# Altium footprint library Amin-Library.PcbLib: 601 footprints (part 35 of 38)
Each footprint in its own frame and in the unit in brackets; x right, y up, seen from the top. Pads: shape width x height; smd on the part's side, far side on the other; paste and mask are expansions set on the pad; w line width, h text height; cw(c..) or ccw(c..) is an arc to the next point about the centre after c.
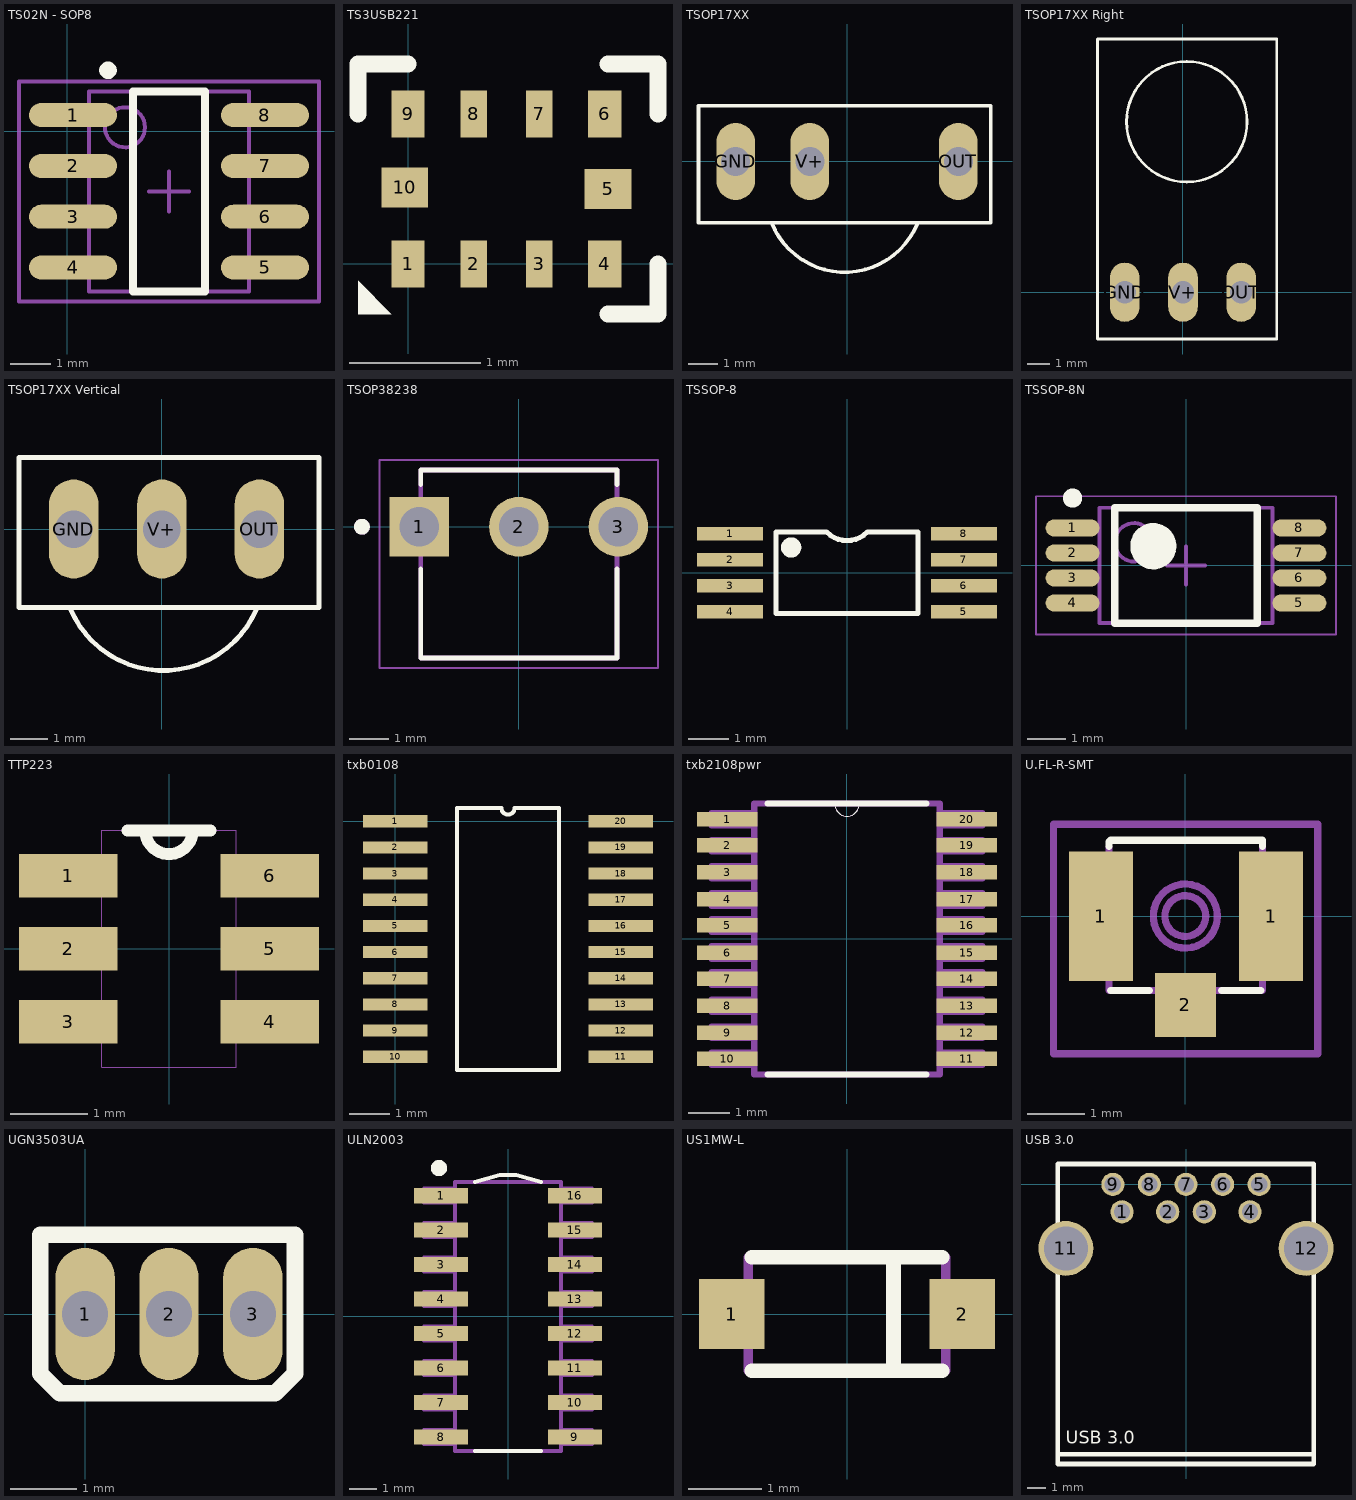
[diagram p34: the footprints below, top view; thin cyan lines are the x and y axes]

## TS02N - SOP8 [mm] "Designed by Hadi Aghabeigi - PANIC Electronic"
height 4
pads (8):
  oval 2.2x0.6 smd: 1(0.14,0.41) 2(0.14,-0.86) 3(0.14,-2.13) 4(0.14,-3.4) 5(4.94,-3.4) 6(4.94,-2.13) 7(4.94,-0.86) 8(4.94,0.41)
Top Overlay:
  circle w0.25: c1.015,1.53 r0.094
  lines w0.2: 1.64,-3.995 1.64,1.005 3.44,1.005 3.44,-3.995 1.64,-3.995
Mechanical 13:
  circle w0.1: c1.44,0.105 r0.5
  lines w0.1: 0.54,-3.995 0.54,1.005 4.54,1.005 4.54,-3.995 0.54,-3.995
Mechanical 15:
  lines w0.1: 2.04,-1.495 3.04,-1.495 ; 2.54,-1.995 2.54,-0.995 ; -1.21,-4.245 -1.21,1.255 6.29,1.255 6.29,-4.245 -1.21,-4.245
3D body: height 1.75, standoff 0, extent 0.54,-3.995 4.54,1.005

## TS3USB221 [mil] "USB multiplex"
pads (10):
  rect 10x14 smd: 1(0,0) 4(59.05,0) 6(59.05,45) 9(0,45)
  rect 8x14 smd: 2(19.68,0) 3(39.37,0) 7(39.37,45) 8(19.68,45)
  rect 14x12 smd: 5(60,22.5) 10(-1,23)
Top Overlay:
  region: -15,-5 -5,-15 -15,-15
  lines w5: -15,45 -15,60 0,60 ; 60,-15 75,-15 75,0 ; 60,60 75,60 75,45

## TSOP17XX [mil] "IR Receiver Dip"
pads (3):
  oval 52x104 hole 39.37: GND(-150,0) OUT(150,0) V+(-50,0)
Top Overlay:
  lines w5: -101.44,-82.82 ccw(c-3.15,-43.11) 95.14,-82.82 ; -200,-82.48 -200,75 -101.57,75 95.28,75 193.7,75 193.7,-82.48 95.28,-82.48 -101.57,-82.48 -200,-82.48
3D body "step_temp.STEP": height 1224.41, standoff 0, extent -196.85,-165.35 196.85,62.99

## TSOP17XX Right [mil] "IR Receiver Dip"
pads (3):
  oval 52x104 hole 39.37: GND(-102.36,0) OUT(102.36,0) V+(0,0)
Top Overlay:
  circle w5: c6.71,299.71 r106.01
  lines w5: -150,-82.28 -51.57,-82.28 145.28,-82.28 165,-82.28 165,445.2 -150,445.2 -150,-82.28
3D body "User Library-User Library-TSSP40_IR reciver.step": height 205.36, standoff -96.46, extent -116.22,-8.33 120,438.33

## TSOP17XX Vertical [mil] "IR Receiver Dip"
pads (3):
  oval 52x104 hole 39.37: GND(-92.52,0) OUT(102.36,0) V+(0,0)
Top Overlay:
  lines w5: -96.58,-82.28 ccw(c1.71,-42.57) 100,-82.28 ; -150,-82.28 -51.57,-82.28 145.28,-82.28 165,-82.28 165,75.2 145.28,75.2 -51.57,75.2 -150,75.2 -150,-82.28
3D body "User Library-IR Receiver.step": height 334.65, standoff -90.55, extent -117.05,-171.22 127.05,65

## TSOP38238 [mm]
pads (3):
  rect 1.518x1.518 hole 1.01: 1(-2.54,0)
  round 1.518 hole 1.01: 2(0,0) 3(2.54,0)
Top Overlay:
  circle w0.2: c-4,0 r0.1
  lines w0.127: -2.5,-1.08 -2.5,-3.35 2.5,-3.35 2.5,-1.08 ; -2.5,1.08 -2.5,1.45 2.5,1.45 2.5,1.08
Mechanical 13:
  circle w0.2: c-4,0 r0.1
  lines w0.127: -2.5,-3.35 2.5,-3.35 2.5,1.45 -2.5,1.45 -2.5,-3.35
Mechanical 15:
  lines w0.05: -3.55,-3.6 3.55,-3.6 3.55,1.7 -3.55,1.7 -3.55,-3.6
3D body "User Library-TSOP18x.step": height 10.95, standoff -4, extent -2.89,-3.4 2.89,1.4

## TSSOP-8 [mil]
pads (8):
  rect 65x13.5 smd: 1(-115.2,38.4) 2(-115.2,12.8) 3(-115.2,-12.8) 4(-115.2,-38.4) 5(115.2,-38.4) 6(115.2,-12.8) 7(115.2,12.8) 8(115.2,38.4)
Top Overlay:
  circle w10: c-55,25 r5
  lines w5: -70,-40 -70,40 -20,40 ccw(c0,60) 20,40 70,40 70,-40 -70,-40
3D body "User Library-TSSOP-8.STEP": height 47.24, standoff 0, extent -125.99,-59.06 125.98,59.05

## TSSOP-8N [mm]
height 1.2
pads (8):
  oval 1.4x0.45 smd: 1(-2.95,0.975) 2(-2.95,0.325) 3(-2.95,-0.325) 4(-2.95,-0.975) 5(2.95,-0.975) 6(2.95,-0.325) 7(2.95,0.325) 8(2.95,0.975)
Top Overlay:
  circle w0.25: c-2.95,1.75 r0.125
  circle w0.6: c-0.85,0.5 r0.3
  lines w0.2: -1.85,-1.5 -1.85,1.5 1.85,1.5 1.85,-1.5 -1.85,-1.5
Mechanical 13:
  circle w0.1: c-1.35,0.6 r0.5
  lines w0.1: -2.25,-1.5 -2.25,1.5 2.25,1.5 2.25,-1.5 -2.25,-1.5
Mechanical 15:
  lines w0.05: -3.9,-1.8 -3.9,1.8 3.9,1.8 3.9,-1.8 -3.9,-1.8
  lines w0.1: -0.5,0 0.5,0 ; 0,-0.5 0,0.5
3D body: height 1.2, standoff 0.05, extent -2.25,-1.5 2.25,1.5

## TTP223 [mil]
pads (6):
  rect 50x22 smd: 1(-51,37) 2(-51,0) 3(-51,-37) 4(51,-37) 5(51,0) 6(51,37)
Top Overlay:
  lines w6: -21,60 -12,60 ; 21,60 12,60 ; -12,60 ccw(c0,60) 12,60 ; -12,60 12,60
Mechanical 4:
  lines w0: -59,-47 -59,-28 ; -59,-47 -34,-47 ; -59,-47 -59,-28 ; -59,-47 -34,-47 ; -59,-28 -34,-28 ; -59,-28 -34,-28 ; -59,-10 -59,10 ; -59,-10 -34,-10 ; -59,-10 -59,10 ; -59,-10 -34,-10 ; -59,10 -34,10 ; -59,10 -34,10 ; -59,28 -59,47 ; -59,28 -34,28 ; -59,28 -59,47 ; -59,28 -34,28 ; -59,47 -34,47 ; -59,47 -34,47 ; -34,-60 34,-60 ; -34,-60 -34,-47 ; -34,-60 34,-60 ; -34,-60 -34,-47 ; -34,-47 -34,-28 ; -34,-47 -34,-28 ; -34,-28 -34,-10 ; -34,-28 -34,-10 ; -34,-10 -34,10 ; -34,-10 -34,10 ; -34,10 -34,28 ; -34,10 -34,28 ; -34,28 -34,47 ; -34,28 -34,47 ; -34,47 -34,60 ; -34,47 -34,60 ; -34,60 -12,60 ; -34,60 -12,60 ; -12,60 ccw(c0,60) 12,60 ; -12,60 ccw(c0,60) 12,60 ; -12,60 12,60 ; -12,60 12,60 ; 12,60 34,60 ; 12,60 34,60 ; 34,-60 34,-47 ; 34,-60 34,-47 ; 34,-47 34,-28 ; 34,-47 59,-47 ; 34,-47 34,-28 ; 34,-47 59,-47 ; 34,-28 34,-10 ; 34,-28 59,-28 ; 34,-28 34,-10 ; 34,-28 59,-28 ; 34,-10 34,10 ; 34,-10 59,-10 ; 34,-10 34,10 ; 34,-10 59,-10 ; 34,10 34,28 ; 34,10 59,10 ; 34,10 34,28 ; 34,10 59,10 ; 34,28 34,47 ; 34,28 59,28 ; 34,28 34,47 ; 34,28 59,28 ; 34,47 34,60 ; 34,47 59,47 ; 34,47 34,60 ; 34,47 59,47 ; 59,-47 59,-28 ; 59,-47 59,-28 ; 59,-10 59,10 ; 59,-10 59,10 ; 59,28 59,47 ; 59,28 59,47
3D body "User Library-SOT23-6-2.STEP": height 57.09, standoff 0, extent -55.11,-57.09 55.13,57.08

## txb0108 [mm]
pads (20):
  rect 1.6x0.3 smd: 1(0,0) 2(0,-0.65) 3(0,-1.3) 4(0,-1.95) 5(0,-2.6) 6(0,-3.25) 7(0,-3.9) 8(0,-4.55) 9(0,-5.2) 10(0,-5.85) 11(5.6,-5.85) 12(5.6,-5.2) 13(5.6,-4.55) 14(5.6,-3.9) 15(5.6,-3.25) 16(5.6,-2.6) 17(5.6,-1.95) 18(5.6,-1.3) 19(5.6,-0.65) 20(5.6,0)
Top Overlay:
  lines w0.1: 1.535,-6.175 4.065,-6.175 4.065,0.325 2.962,0.325 cw(c2.8,0.325) 2.638,0.325 1.535,0.325 1.535,-6.175
3D body "TXB0108PWR--3DModel-STEP-56544 (2).STEP": height 1.18, standoff -0.02, extent -0.406,-6.171 5.994,0.329

## txb2108pwr [mil]
pads (20):
  rect 58x14 smd: 1(-115,115) 2(-115,90) 3(-115,64) 4(-115,38) 5(-115,13) 6(-115,-13) 7(-115,-38) 8(-115,-64) 9(-115,-90) 10(-115,-115) 11(115,-115) 12(115,-90) 13(115,-64) 14(115,-38) 15(115,-13) 16(115,13) 17(115,38) 18(115,64) 19(115,90) 20(115,115)
Top Overlay:
  lines w0: -12,130 ccw(c0,130) 12,130
  lines w6: -76,-130 76,-130 ; -76,130 -12,130 12,130 76,130
Mechanical 1:
  lines w0: -12,130 ccw(c0,130) 12,130
  lines w6: -130,-121 -130,-109 -89,-109 -89,-121 -130,-121 ; -130,-95 -130,-84 -89,-84 -89,-95 -130,-95 ; -130,-70 -130,-58 -89,-58 -89,-70 -130,-70 ; -130,-44 -130,-32 -89,-32 -89,-44 -130,-44 ; -130,-19 -130,-7 -89,-7 -89,-19 -130,-19 ; -130,7 -130,19 -89,19 -89,7 -130,7 ; -130,32 -130,44 -89,44 -89,32 -130,32 ; -130,58 -130,70 -89,70 -89,58 -130,58 ; -130,84 -130,95 -89,95 -89,84 -130,84 ; -130,109 -130,121 -89,121 -89,109 -130,109 ; -89,-130 89,-130 89,130 12,130 -12,130 -89,130 -89,-130 ; 89,-121 89,-109 130,-109 130,-121 89,-121 ; 89,-95 89,-84 130,-84 130,-95 89,-95 ; 89,-70 89,-58 130,-58 130,-70 89,-70 ; 89,-44 89,-32 130,-32 130,-44 89,-44 ; 89,-19 89,-7 130,-7 130,-19 89,-19 ; 89,7 89,19 130,19 130,7 89,7 ; 89,32 89,44 130,44 130,32 89,32 ; 89,58 89,70 130,70 130,58 89,58 ; 89,84 89,95 130,95 130,84 89,84 ; 89,109 89,121 130,121 130,109 89,109

## U.FL-R-SMT [mil]
pads (3):
  rect 44x89 smd: 1(-58.07,0) 1(59,0)
  rect 42x44 smd: 2(0,-61.02)
Top Overlay:
  lines w5: -52.36,48 -52.36,51 ; -51.18,-51.18 -24.8,-51.18 ; -51.18,52 52,52 ; 25,-51.18 52,-51.18 ; 53,48 53,52
Mechanical 16:
  circle w5: c0,0 r22
  circle w5: c0,0 r14
  lines w5: -61.81,-35.04 -52.36,-35.04 -52.36,-35.43 ; -61.81,35 -52.36,35 ; -61.42,-35.43 -61.42,35 ; -52.36,-51.18 -52.36,47 ; -24.8,-51.18 25,-51.18 ; 53,-51.18 53,48 ; 53,-35.43 62,-35.43 62,35 55,35
Mechanical 27:
  lines w5: -90.55,-94.49 91,-94.49 91,63 -90.55,63 -90.55,-94.49
Mechanical 30:
  lines w5: -52.36,-51.18 -51.57,-51.18 ; 53,-35.83 53,-35.43

## UGN3503UA [mm] "TO-92"
height 22
pads (3):
  oval 0.9x2 hole 0.7: 1(0,0) 2(1.27,0) 3(2.54,0)
Top Overlay:
  lines w0.203: 0.127,-1.2 2.447,-1.2 ; 3.175,-0.11 3.175,1.2
  lines w0.254: -0.68,-0.901 -0.68,1.2 3.175,1.2 3.175,-0.901 2.876,-1.2 2.447,-1.2 -0.381,-1.2 -0.68,-0.901
3D body "TO-92.STEP": height 3.55, standoff -4.54, extent -0.78,-1.07 3.32,0.55

## ULN2003 [mil] "SOIC127P600X175-16N"
height 629.92
pads (16):
  rect 78x22 smd: 1(-97,175) 2(-97,125) 3(-97,75) 4(-97,25) 5(-97,-25) 6(-97,-75) 7(-97,-125) 8(-97,-175) 9(97,-175) 10(97,-125) 11(97,-75) 12(97,-25) 13(97,25) 14(97,75) 15(97,125) 16(97,175)
Top Overlay:
  circle w11.81: c-100,215 r5.91
  lines w6: -48,-195 48,-195 ; -48,195 -12,205 12,205 48,195
Mechanical 13:
  lines w6: -122,-185 -77,-185 -77,-165 -122,-165 -122,-185 ; -122,-135 -77,-135 -77,-115 -122,-115 -122,-135 ; -122,-85 -77,-85 -77,-65 -122,-65 -122,-85 ; -122,-35 -77,-35 -77,-15 -122,-15 -122,-35 ; -122,15 -77,15 -77,35 -122,35 -122,15 ; -122,65 -77,65 -77,85 -122,85 -122,65 ; -122,115 -77,115 -77,135 -122,135 -122,115 ; -122,165 -77,165 -77,185 -122,185 -122,165 ; -77,-195 -77,195 -12,195 12,195 77,195 77,-195 -77,-195 ; 77,-185 122,-185 122,-165 77,-165 77,-185 ; 77,-135 122,-135 122,-115 77,-115 77,-135 ; 77,-85 122,-85 122,-65 77,-65 77,-85 ; 77,-35 122,-35 122,-15 77,-15 77,-35 ; 77,15 122,15 122,35 77,35 77,15 ; 77,65 122,65 122,85 77,85 77,65 ; 77,115 122,115 122,135 77,135 77,115 ; 77,165 122,165 122,185 77,185 77,165
3D body "ULN2003AD.STEP": height 68.9, standoff 0, extent -118.11,-195 118.11,194.76

## US1MW-L [mm] "SOD-123"
pads (2):
  rect 0.9x0.95 smd: 1(-1.575,0) 2(1.575,0)
Top Overlay:
  lines w0.203: -1.3,-0.775 0.635,-0.775 0.635,0.775 -1.3,0.775 ; -0.5,-0.775 1.3,-0.775 ; -0.5,0.775 1.3,0.775
Mechanical 13:
  lines w0.127: -1.35,-0.775 1.35,-0.775 1.35,0.775 -1.35,0.775 -1.35,-0.775
3D body "CircuitWorks-SOD123.step": height 1.28, standoff 0.01, extent -1.85,-0.8 1.85,0.8

## USB 3.0 [mm] "Type A female"
pads (11):
  round 1.27 hole 0.889: 1(-3.5,-1.5) 2(-1,-1.5) 3(1,-1.5) 4(3.5,-1.5) 5(4,0) 6(2,0) 7(0,0) 8(-2,0) 9(-4,0)
  round 3 hole 2.4: 11(-6.57,-3.5) 12(6.57,-3.5)
Top Overlay:
  lines w0.254: -7.01,-14.757 6.985,-14.757 ; -7.01,-15.291 6.985,-15.291 6.985,1.118 -7.01,1.118 -7.01,-15.291
  text "USB 3.0" at -6.579,-14.427 h1.2